# Altium footprint library WR-BHD.PcbLib: 220 footprints (part 8 of 14)
Each footprint in its own frame and in the unit in brackets; x right, y up, seen from the top. Pads: shape width x height; smd on the part's side, far side on the other; paste and mask are expansions set on the pad; w line width, h text height; cw(c..) or ccw(c..) is an arc to the next point about the centre after c.
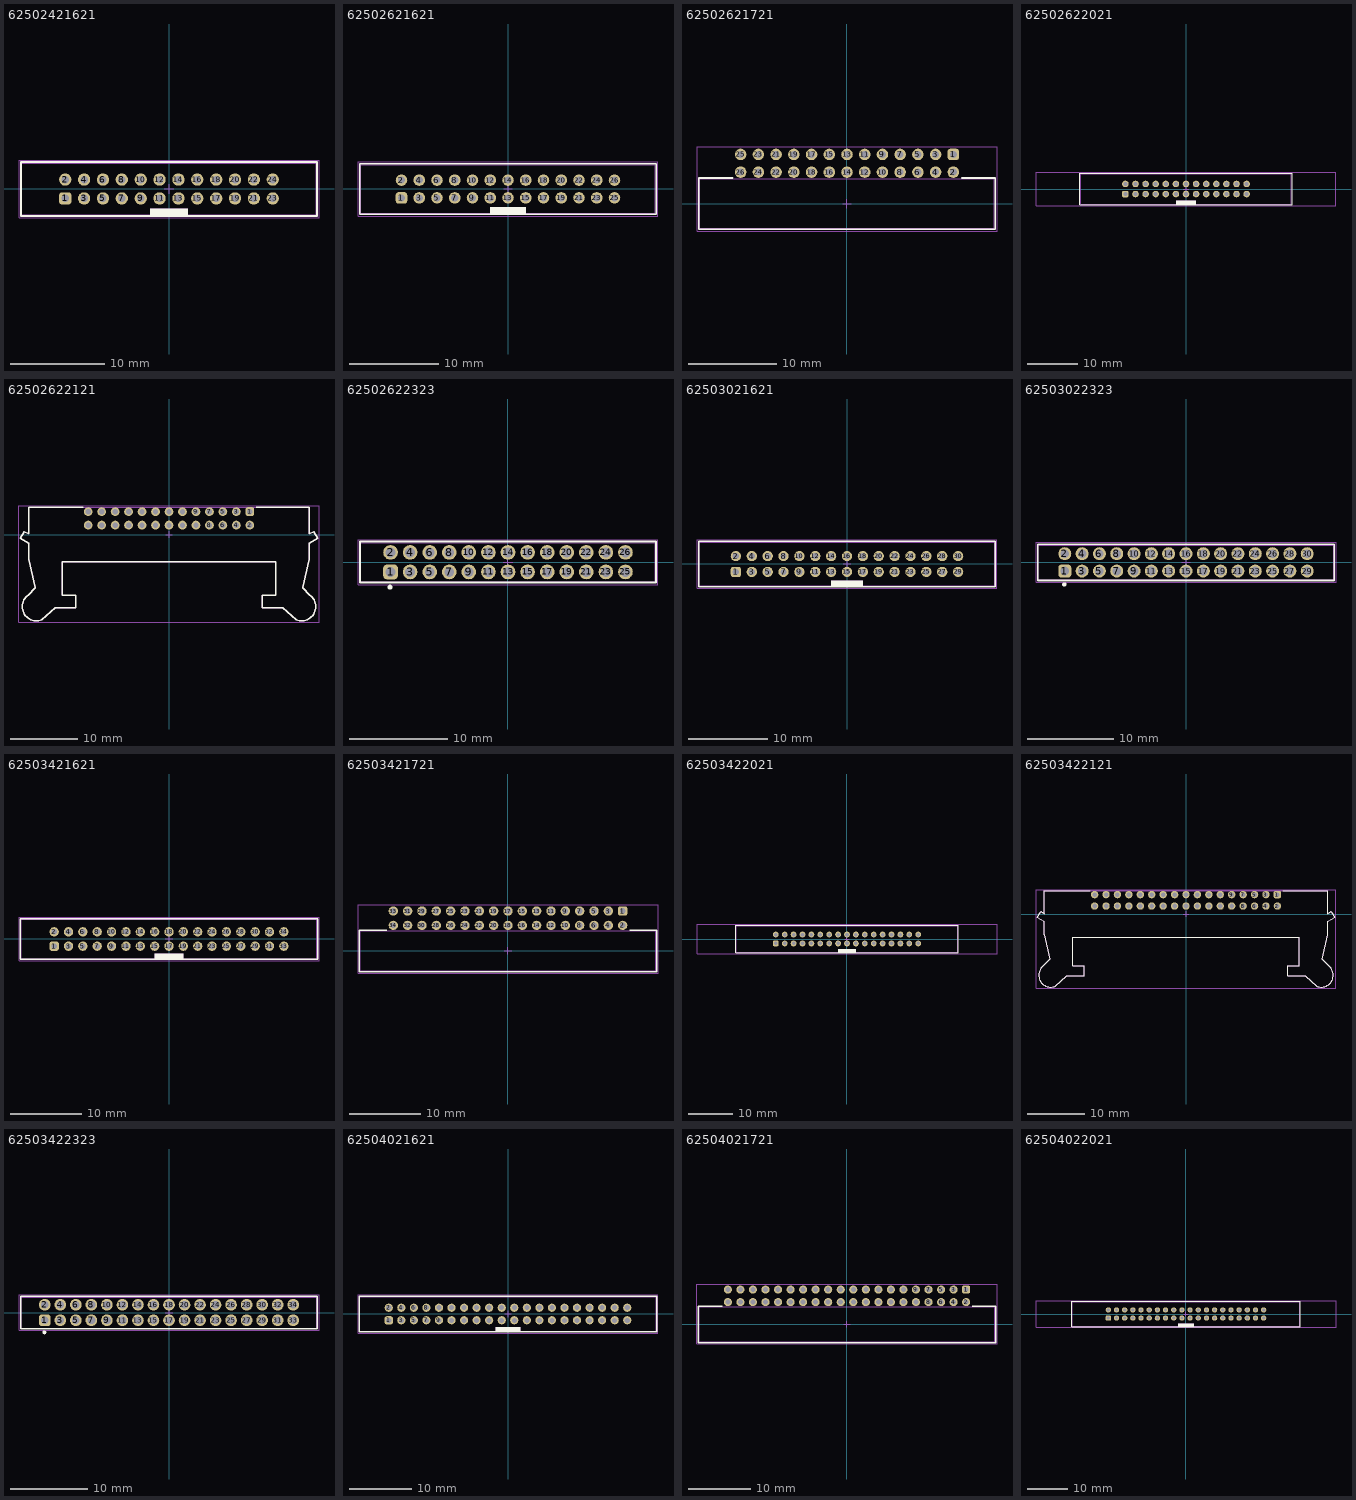
[diagram p7: the footprints below, top view; thin cyan lines are the x and y axes]

## 62502421621 [mm] "2.00mm Male Box Header, 24p"
height 5.6
pads (24):
  rrect50% 1.3x1.3 hole 0.8: 1(-11,-1)
  round 1.3 hole 0.8: 2(-11,1) 3(-9,-1) 4(-9,1) 5(-7,-1) 6(-7,1) 7(-5,-1) 8(-5,1) 9(-3,-1) 10(-3,1) 11(-1,-1) 12(-1,1) 13(1,-1) 14(1,1) 15(3,-1) 16(3,1) 17(5,-1) 18(5,1) 19(7,-1) 20(7,1) 21(9,-1) 22(9,1) 23(11,-1) 24(11,1)
Top Overlay:
  rectangle: -2,-2.85 2,-2.05
  lines w0.2: -15.7,-2.85 15.7,-2.85 15.7,2.85 -15.7,2.85 -15.7,-2.85
Top Assembly:
  rectangle: -2,-2.75 2,-2.05
  lines w0.1: -15.6,-2.75 -15.6,2.75 15.6,2.75 15.6,-2.75 -15.6,-2.75
Top Designator:
  text ".Designator" at -3.647,-0.357 h1
Top 3D Body:
  rectangle: -2,-2.75 2,-2.05
  lines w0.1: -15.6,-2.75 15.6,-2.75 15.6,2.75 -15.6,2.75 -15.6,-2.75
Top Courtyard:
  lines w0.05: -15.9,-3.05 -15.9,3.05 15.9,3.05 15.9,-3.05 -15.9,-3.05
Top Component Center:
  lines w0.1: -0.5,0 0.5,0 ; 0,-0.5 0,0.5
3D body "62502421621.stp": height 5.65, standoff -2.5, extent -15.6,-2.75 15.6,2.75

## 62502621621 [mm] "2.00mm Male Box Header, 26p"
height 5.6
pads (26):
  rrect50% 1.3x1.3 hole 0.8: 1(-12,-1)
  round 1.3 hole 0.8: 2(-12,1) 3(-10,-1) 4(-10,1) 5(-8,-1) 6(-8,1) 7(-6,-1) 8(-6,1) 9(-4,-1) 10(-4,1) 11(-2,-1) 12(-2,1) 13(0,-1) 14(0,1) 15(2,-1) 16(2,1) 17(4,-1) 18(4,1) 19(6,-1) 20(6,1) 21(8,-1) 22(8,1) 23(10,-1) 24(10,1) 25(12,-1) 26(12,1)
Top Overlay:
  rectangle: -2,-2.85 2,-2.05
  lines w0.2: -16.7,-2.85 16.7,-2.85 16.7,2.85 -16.7,2.85 -16.7,-2.85
Top Assembly:
  rectangle: -2,-2.75 2,-2.05
  lines w0.1: -16.6,-2.75 -16.6,2.75 16.6,2.75 16.6,-2.75 -16.6,-2.75
Top Designator:
  text ".Designator" at -3.647,-0.357 h1
Top 3D Body:
  rectangle: -2,-2.75 2,-2.05
  lines w0.1: -16.6,-2.75 16.6,-2.75 16.6,2.75 -16.6,2.75 -16.6,-2.75
Top Courtyard:
  lines w0.05: -16.9,-3.05 -16.9,3.05 16.9,3.05 16.9,-3.05 -16.9,-3.05
Top Component Center:
  lines w0.1: -0.5,0 0.5,0 ; 0,-0.5 0,0.5
3D body "62502621621.stp": height 5.65, standoff -2.5, extent -16.6,-2.75 16.6,2.75

## 62502621721 [mm] "2.00mm Male Angled Box Header, 26p"
height 5.4
pads (26):
  rrect50% 1.3x1.3 hole 0.8: 1(12,5.55)
  round 1.3 hole 0.8: 2(12,3.55) 3(10,5.55) 4(10,3.55) 5(8,5.55) 6(8,3.55) 7(6,5.55) 8(6,3.55) 9(4,5.55) 10(4,3.55) 11(2,5.55) 12(2,3.55) 13(0,5.55) 14(0,3.55) 15(-2,5.55) 16(-2,3.55) 17(-4,5.55) 18(-4,3.55) 19(-6,5.55) 20(-6,3.55) 21(-8,5.55) 22(-8,3.55) 23(-10,5.55) 24(-10,3.55) 25(-12,5.55) 26(-12,3.55)
Top Overlay:
  lines w0.2: -12.9,2.9 -16.725,2.9 -16.725,-2.9 16.725,-2.9 16.725,2.9 12.95,2.9
Top Assembly:
  lines w0.1: -16.6,-2.8 16.6,-2.8 16.6,2.8 -16.6,2.8 -16.6,-2.8
Top Designator:
  text ".Designator" at -3.647,-0.357 h1
Top 3D Body:
  lines w0.1: -16.6,-2.8 -16.6,2.8 16.6,2.8 16.6,-2.8 -16.6,-2.8
Top Courtyard:
  lines w0.05: -16.925,-3.1 16.925,-3.1 16.925,6.4 -16.925,6.4 -16.925,-3.1
Top Component Center:
  lines w0.1: -0.5,0 0.5,0 ; 0,-0.5 0,0.5
3D body "62502621721 (rev1).stp": height 5.5, standoff -2.85, extent -16.6,-2.8 16.6,5.8

## 62502622021 [mm] "2.00mm Male Box Header with Lever, 26p"
height 16.85
pads (26):
  rrect50% 1.3x1.3 hole 0.8: 1(-12,-1)
  round 1.3 hole 0.8: 2(-12,1) 3(-10,-1) 4(-10,1) 5(-8,-1) 6(-8,1) 7(-6,-1) 8(-6,1) 9(-4,-1) 10(-4,1) 11(-2,-1) 12(-2,1) 13(0,-1) 14(0,1) 15(2,-1) 16(2,1) 17(4,-1) 18(4,1) 19(6,-1) 20(6,1) 21(8,-1) 22(8,1) 23(10,-1) 24(10,1) 25(12,-1) 26(12,1)
Top Overlay:
  rectangle: -2,-3.1 2,-2.3
  lines w0.2: -21,-3.1 -21,3.1 21,3.1 21,-3.1 -21,-3.1
Top Assembly:
  rectangle: -2,-3 2,-2.3
  lines w0.1: -20.85,-3 -20.85,3 20.85,3 20.85,-3 -20.85,-3
Top Designator:
  text ".Designator" at -3.647,-0.357 h1
Top 3D Body:
  rectangle: -2,-3 2,-2.3
  lines w0.1: -20.85,-3 20.85,-3 20.85,3 -20.85,3 -20.85,-3
Top Courtyard:
  lines w0.05: -29.7,-3.3 29.7,-3.3 29.7,3.3 -29.7,3.3 -29.7,-3.3
Top Component Center:
  lines w0.1: -0.5,0 0.5,0 ; 0,-0.5 0,0.5
3D body "62502622021.stp": height 16.9, standoff -2.95, extent -22.062,-3 22.063,3

## 62502622121 [mm] "2.00mm Male Angled Box Header with Lever, 26p"
height 3.15
pads (26):
  rrect50% 1.3x1.3 hole 0.8: 1(12,3.4)
  round 1.3 hole 0.8: 2(12,1.4) 3(10,3.4) 4(10,1.4) 5(8,3.4) 6(8,1.4) 7(6,3.4) 8(6,1.4) 9(4,3.4) 10(4,1.4) 11(2,3.4) 12(2,1.4) 13(0,3.4) 14(0,1.4) 15(-2,3.4) 16(-2,1.4) 17(-4,3.4) 18(-4,1.4) 19(-6,3.4) 20(-6,1.4) 21(-8,3.4) 22(-8,1.4) 23(-10,3.4) 24(-10,1.4) 25(-12,3.4) 26(-12,1.4)
Top Overlay:
  lines w0.2: -21.466,0.438 -22.06,-0.59 -20.851,-1.288 -20.851,-3.622 ; -21.46,0.44 -20.848,0.087 ; -20.894,-8.986 ccw(c-19.68,-10.7) -18.865,-12.635 ; -20.892,-8.989 -19.85,-7.91 -20.837,-3.637 ; -20.85,0.089 -20.85,4.05 -12.75,4.05 ; -18.866,-12.634 -16.85,-10.85 -13.85,-10.85 -13.85,-9.05 -15.85,-9.05 -15.85,-4.05 15.85,-4.05 15.85,-9.05 13.85,-9.05 13.85,-10.85 16.85,-10.85 18.866,-12.634 ; 12.95,4.05 20.85,4.05 20.85,0.089 ; 18.865,-12.635 ccw(c19.68,-10.7) 20.894,-8.986 ; 20.837,-3.637 19.85,-7.91 20.892,-8.989 ; 20.848,0.087 21.46,0.44 ; 20.851,-3.622 20.851,-1.288 22.06,-0.59 21.466,0.438
Top Designator:
  text ".Designator" at -3.647,-0.357 h1
Top 3D Body:
  lines w0.1: -21.466,0.438 -22.06,-0.59 -20.851,-1.288 -20.851,-3.622 ; -21.46,0.44 -20.848,0.087 ; -20.894,-8.986 ccw(c-19.68,-10.7) -18.865,-12.635 ; -20.892,-8.989 -19.85,-7.91 -20.837,-3.637 ; -20.85,0.089 -20.85,4.05 20.85,4.05 ; -18.866,-12.634 -16.85,-10.85 -13.85,-10.85 -13.85,-9.05 -15.85,-9.05 -15.85,-4.05 15.85,-4.05 15.85,-9.05 13.85,-9.05 13.85,-10.85 16.85,-10.85 18.866,-12.634 ; 18.865,-12.635 ccw(c19.68,-10.7) 20.894,-8.986 ; 20.837,-3.637 19.85,-7.91 20.892,-8.989 ; 20.848,0.087 21.46,0.44 ; 20.848,4.048 20.85,4.05 ; 20.85,0.089 20.85,4.05 ; 20.851,-3.622 20.851,-1.288 22.06,-0.59 21.466,0.438
Top Courtyard:
  lines w0.05: -22.262,-13 22.262,-13 22.262,4.25 -22.262,4.25 -22.262,-13
Top Component Center:
  lines w0.1: -0.5,0 0.5,0 ; 0,-0.5 0,0.5
3D body "62502622121.stp": height 6.1, standoff -3.05, extent -22.062,-12.8 22.062,4.05

## 62502622323 [mm] "Board to Cable Transition Connector, pitch 2mm, 26p"
height 5
pads (26):
  rrect50% 1.5x1.5 hole 1: 1(-12,-1)
  round 1.5 hole 1: 2(-12,1) 3(-10,-1) 4(-10,1) 5(-8,-1) 6(-8,1) 7(-6,-1) 8(-6,1) 9(-4,-1) 10(-4,1) 11(-2,-1) 12(-2,1) 13(0,-1) 14(0,1) 15(2,-1) 16(2,1) 17(4,-1) 18(4,1) 19(6,-1) 20(6,1) 21(8,-1) 22(8,1) 23(10,-1) 24(10,1) 25(12,-1) 26(12,1)
Top Overlay:
  circle w0.25: c-12.05,-2.55 r0.125
  lines w0.2: -15.125,-2.1 15.125,-2.1 15.125,2.1 -15.125,2.1 -15.125,-2.1
Top Assembly:
  lines w0.1: -15.05,-2 15.05,-2 15.05,2 -15.05,2 -15.05,-2
Top Designator:
  text ".Designator" at -3.647,-0.357 h1
Top 3D Body:
  lines w0.1: -15.05,-2 -15.05,2 15.05,2 15.05,-2 -15.05,-2
Top Courtyard:
  lines w0.05: -15.325,-2.3 -15.325,2.3 15.325,2.3 15.325,-2.3 -15.325,-2.3
Top Component Center:
  lines w0.1: -0.5,0 0.5,0 ; 0,-0.5 0,0.5
3D body "62502622323.stp": height 7.23, standoff -2.77, extent -15.05,-2 15.05,2

## 62503021621 [mm] "2.00mm Male Box Header, 30p"
height 5.6
pads (30):
  rrect50% 1.3x1.3 hole 0.8: 1(-14,-1)
  round 1.3 hole 0.8: 2(-14,1) 3(-12,-1) 4(-12,1) 5(-10,-1) 6(-10,1) 7(-8,-1) 8(-8,1) 9(-6,-1) 10(-6,1) 11(-4,-1) 12(-4,1) 13(-2,-1) 14(-2,1) 15(0,-1) 16(0,1) 17(2,-1) 18(2,1) 19(4,-1) 20(4,1) 21(6,-1) 22(6,1) 23(8,-1) 24(8,1) 25(10,-1) 26(10,1) 27(12,-1) 28(12,1) 29(14,-1) 30(14,1)
Top Overlay:
  rectangle: -2,-2.85 2,-2.05
  lines w0.2: -18.7,-2.85 18.7,-2.85 18.7,2.85 -18.7,2.85 -18.7,-2.85
Top Assembly:
  rectangle: -2,-2.75 2,-2.05
  lines w0.1: -18.6,-2.75 -18.6,2.75 18.6,2.75 18.6,-2.75 -18.6,-2.75
Top Designator:
  text ".Designator" at -3.647,-0.357 h1
Top 3D Body:
  rectangle: -2,-2.75 2,-2.05
  lines w0.1: -18.6,-2.75 18.6,-2.75 18.6,2.75 -18.6,2.75 -18.6,-2.75
Top Courtyard:
  lines w0.05: -18.9,-3.05 -18.9,3.05 18.9,3.05 18.9,-3.05 -18.9,-3.05
Top Component Center:
  lines w0.1: -0.5,0 0.5,0 ; 0,-0.5 0,0.5
3D body "62503021621.stp": height 5.65, standoff -2.5, extent -18.6,-2.75 18.6,2.75

## 62503022323 [mm] "Board to Cable Transition Connector, pitch 2mm, 30p"
height 5
pads (30):
  rrect50% 1.5x1.5 hole 1: 1(-14,-1)
  round 1.5 hole 1: 2(-14,1) 3(-12,-1) 4(-12,1) 5(-10,-1) 6(-10,1) 7(-8,-1) 8(-8,1) 9(-6,-1) 10(-6,1) 11(-4,-1) 12(-4,1) 13(-2,-1) 14(-2,1) 15(0,-1) 16(0,1) 17(2,-1) 18(2,1) 19(4,-1) 20(4,1) 21(6,-1) 22(6,1) 23(8,-1) 24(8,1) 25(10,-1) 26(10,1) 27(12,-1) 28(12,1) 29(14,-1) 30(14,1)
Top Overlay:
  circle w0.25: c-14.05,-2.55 r0.125
  lines w0.2: -17.125,-2.1 17.125,-2.1 17.125,2.1 -17.125,2.1 -17.125,-2.1
Top Assembly:
  lines w0.1: -17.05,-2 17.05,-2 17.05,2 -17.05,2 -17.05,-2
Top Designator:
  text ".Designator" at -3.647,-0.357 h1
Top 3D Body:
  lines w0.1: -17.05,-2 -17.05,2 17.05,2 17.05,-2 -17.05,-2
Top Courtyard:
  lines w0.05: -17.325,-2.3 -17.325,2.3 17.325,2.3 17.325,-2.3 -17.325,-2.3
Top Component Center:
  lines w0.1: -0.5,0 0.5,0 ; 0,-0.5 0,0.5
3D body "62503022323.stp": height 7.23, standoff -2.77, extent -17.05,-2 17.05,2

## 62503421621 [mm] "2.00mm Male Box Header, 34p"
height 5.6
pads (34):
  rrect50% 1.3x1.3 hole 0.8: 1(-16,-1)
  round 1.3 hole 0.8: 2(-16,1) 3(-14,-1) 4(-14,1) 5(-12,-1) 6(-12,1) 7(-10,-1) 8(-10,1) 9(-8,-1) 10(-8,1) 11(-6,-1) 12(-6,1) 13(-4,-1) 14(-4,1) 15(-2,-1) 16(-2,1) 17(0,-1) 18(0,1) 19(2,-1) 20(2,1) 21(4,-1) 22(4,1) 23(6,-1) 24(6,1) 25(8,-1) 26(8,1) 27(10,-1) 28(10,1) 29(12,-1) 30(12,1) 31(14,-1) 32(14,1) 33(16,-1) 34(16,1)
Top Overlay:
  rectangle: -2,-2.85 2,-2.05
  lines w0.2: -20.7,-2.85 20.7,-2.85 20.7,2.85 -20.7,2.85 -20.7,-2.85
Top Assembly:
  rectangle: -2,-2.75 2,-2.05
  lines w0.1: -20.6,-2.75 -20.6,2.75 20.6,2.75 20.6,-2.75 -20.6,-2.75
Top Designator:
  text ".Designator" at -3.647,-0.357 h1
Top 3D Body:
  rectangle: -2,-2.75 2,-2.05
  lines w0.1: -20.6,-2.75 20.6,-2.75 20.6,2.75 -20.6,2.75 -20.6,-2.75
Top Courtyard:
  lines w0.05: -20.9,-3.05 -20.9,3.05 20.9,3.05 20.9,-3.05 -20.9,-3.05
Top Component Center:
  lines w0.1: -0.5,0 0.5,0 ; 0,-0.5 0,0.5
3D body "62503421621.stp": height 5.65, standoff -2.5, extent -20.6,-2.75 20.6,2.75

## 62503421721 [mm] "2.00mm Male Angled Box Header, 34p"
height 5.4
pads (34):
  rrect50% 1.3x1.3 hole 0.8: 1(16,5.55)
  round 1.3 hole 0.8: 2(16,3.55) 3(14,5.55) 4(14,3.55) 5(12,5.55) 6(12,3.55) 7(10,5.55) 8(10,3.55) 9(8,5.55) 10(8,3.55) 11(6,5.55) 12(6,3.55) 13(4,5.55) 14(4,3.55) 15(2,5.55) 16(2,3.55) 17(0,5.55) 18(0,3.55) 19(-2,5.55) 20(-2,3.55) 21(-4,5.55) 22(-4,3.55) 23(-6,5.55) 24(-6,3.55) 25(-8,5.55) 26(-8,3.55) 27(-10,5.55) 28(-10,3.55) 29(-12,5.55) 30(-12,3.55) 31(-14,5.55) 32(-14,3.55) 33(-16,5.55) 34(-16,3.55)
Top Overlay:
  lines w0.2: -16.9,2.9 -20.725,2.9 -20.725,-2.9 20.725,-2.9 20.725,2.9 16.95,2.9
Top Assembly:
  lines w0.1: -20.6,-2.8 -20.6,2.8 20.6,2.8 20.6,-2.8 -20.6,-2.8
Top Designator:
  text ".Designator" at -3.647,-0.357 h1
Top 3D Body:
  lines w0.1: -20.6,-2.8 20.6,-2.8 20.6,2.8 -20.6,2.8 -20.6,-2.8
Top Courtyard:
  lines w0.05: -20.925,-3.1 -20.925,6.4 20.925,6.4 20.925,-3.1 -20.925,-3.1
Top Component Center:
  lines w0.1: -0.5,0 0.5,0 ; 0,-0.5 0,0.5
3D body "62503421721 (rev1).stp": height 5.5, standoff -2.85, extent -20.6,-2.8 20.6,5.8

## 62503422021 [mm] "2.00mm Male Box Header with Lever, 34p"
height 16.85
pads (34):
  rrect50% 1.3x1.3 hole 0.8: 1(-16,-1)
  round 1.3 hole 0.8: 2(-16,1) 3(-14,-1) 4(-14,1) 5(-12,-1) 6(-12,1) 7(-10,-1) 8(-10,1) 9(-8,-1) 10(-8,1) 11(-6,-1) 12(-6,1) 13(-4,-1) 14(-4,1) 15(-2,-1) 16(-2,1) 17(0,-1) 18(0,1) 19(2,-1) 20(2,1) 21(4,-1) 22(4,1) 23(6,-1) 24(6,1) 25(8,-1) 26(8,1) 27(10,-1) 28(10,1) 29(12,-1) 30(12,1) 31(14,-1) 32(14,1) 33(16,-1) 34(16,1)
Top Overlay:
  rectangle: -2,-3.1 2,-2.3
  lines w0.2: -25,-3.1 25,-3.1 25,3.1 -25,3.1 -25,-3.1
Top Assembly:
  rectangle: -2,-3 2,-2.3
  lines w0.1: -24.85,-3 24.85,-3 24.85,3 -24.85,3 -24.85,-3
Top Designator:
  text ".Designator" at -3.647,-0.357 h1
Top 3D Body:
  rectangle: -2,-3 2,-2.3
  lines w0.1: -24.85,-3 -24.85,3 24.85,3 24.85,-3 -24.85,-3
Top Courtyard:
  lines w0.05: -33.7,-3.3 -33.7,3.3 33.7,3.3 33.7,-3.3 -33.7,-3.3
Top Component Center:
  lines w0.1: -0.5,0 0.5,0 ; 0,-0.5 0,0.5
3D body "62503422021.stp": height 16.9, standoff -2.95, extent -26.062,-3 26.063,3

## 62503422121 [mm] "2.00mm Male Angled Box Header with Lever, 34p"
height 3.15
pads (34):
  rrect50% 1.3x1.3 hole 0.8: 1(16,3.4)
  round 1.3 hole 0.8: 2(16,1.4) 3(14,3.4) 4(14,1.4) 5(12,3.4) 6(12,1.4) 7(10,3.4) 8(10,1.4) 9(8,3.4) 10(8,1.4) 11(6,3.4) 12(6,1.4) 13(4,3.4) 14(4,1.4) 15(2,3.4) 16(2,1.4) 17(0,3.4) 18(0,1.4) 19(-2,3.4) 20(-2,1.4) 21(-4,3.4) 22(-4,1.4) 23(-6,3.4) 24(-6,1.4) 25(-8,3.4) 26(-8,1.4) 27(-10,3.4) 28(-10,1.4) 29(-12,3.4) 30(-12,1.4) 31(-14,3.4) 32(-14,1.4) 33(-16,3.4) 34(-16,1.4)
Top Overlay:
  lines w0.2: -25.466,0.438 -26.06,-0.59 -24.851,-1.288 -24.851,-3.622 ; -25.46,0.44 -24.848,0.087 ; -24.894,-8.986 ccw(c-23.68,-10.7) -22.865,-12.635 ; -24.892,-8.989 -23.85,-7.91 -24.837,-3.637 ; -24.85,0.089 -24.85,4.05 -16.75,4.05 ; -22.866,-12.634 -20.85,-10.85 -17.85,-10.85 -17.85,-9.05 -19.85,-9.05 -19.85,-4.05 19.85,-4.05 19.85,-9.05 17.85,-9.05 17.85,-10.85 20.85,-10.85 22.866,-12.634 ; 16.95,4.05 24.85,4.05 24.85,0.089 ; 22.865,-12.635 ccw(c23.68,-10.7) 24.894,-8.986 ; 24.837,-3.637 23.85,-7.91 24.892,-8.989 ; 24.848,0.087 25.46,0.44 ; 24.851,-3.622 24.851,-1.288 26.06,-0.59 25.466,0.438
Top Designator:
  text ".Designator" at -3.647,-0.357 h1
Top 3D Body:
  lines w0.1: -25.466,0.438 -26.06,-0.59 -24.851,-1.288 -24.851,-3.622 ; -25.46,0.44 -24.848,0.087 ; -24.894,-8.986 ccw(c-23.68,-10.7) -22.865,-12.635 ; -24.892,-8.989 -23.85,-7.91 -24.837,-3.637 ; -24.85,0.089 -24.85,4.05 24.85,4.05 ; -22.866,-12.634 -20.85,-10.85 -17.85,-10.85 -17.85,-9.05 -19.85,-9.05 -19.85,-4.05 19.85,-4.05 19.85,-9.05 17.85,-9.05 17.85,-10.85 20.85,-10.85 22.866,-12.634 ; 22.865,-12.635 ccw(c23.68,-10.7) 24.894,-8.986 ; 24.837,-3.637 23.85,-7.91 24.892,-8.989 ; 24.848,0.087 25.46,0.44 ; 24.848,4.048 24.85,4.05 ; 24.85,0.089 24.85,4.05 ; 24.851,-3.622 24.851,-1.288 26.06,-0.59 25.466,0.438
Top Courtyard:
  lines w0.05: -26.262,-13 -26.262,4.25 26.262,4.25 26.262,-13 -26.262,-13
Top Component Center:
  lines w0.1: -0.5,0 0.5,0 ; 0,-0.5 0,0.5
3D body "62503422121.stp": height 6.1, standoff -3.05, extent -26.062,-12.8 26.062,4.05

## 62503422323 [mm] "Board to Cable Transition Connector, pitch 2mm, 34p"
height 5
pads (34):
  rrect50% 1.5x1.5 hole 1: 1(-16,-1)
  round 1.5 hole 1: 2(-16,1) 3(-14,-1) 4(-14,1) 5(-12,-1) 6(-12,1) 7(-10,-1) 8(-10,1) 9(-8,-1) 10(-8,1) 11(-6,-1) 12(-6,1) 13(-4,-1) 14(-4,1) 15(-2,-1) 16(-2,1) 17(0,-1) 18(0,1) 19(2,-1) 20(2,1) 21(4,-1) 22(4,1) 23(6,-1) 24(6,1) 25(8,-1) 26(8,1) 27(10,-1) 28(10,1) 29(12,-1) 30(12,1) 31(14,-1) 32(14,1) 33(16,-1) 34(16,1)
Top Overlay:
  circle w0.25: c-16.05,-2.55 r0.125
  lines w0.2: -19.125,-2.1 19.125,-2.1 19.125,2.1 -19.125,2.1 -19.125,-2.1
Top Assembly:
  lines w0.1: -19.05,-2 19.05,-2 19.05,2 -19.05,2 -19.05,-2
Top Designator:
  text ".Designator" at -3.647,-0.357 h1
Top 3D Body:
  lines w0.1: -19.05,-2 -19.05,2 19.05,2 19.05,-2 -19.05,-2
Top Courtyard:
  lines w0.05: -19.325,-2.3 -19.325,2.3 19.325,2.3 19.325,-2.3 -19.325,-2.3
Top Component Center:
  lines w0.1: -0.5,0 0.5,0 ; 0,-0.5 0,0.5
3D body "62503422323.stp": height 7.23, standoff -2.77, extent -19.05,-2 19.05,2

## 62504021621 [mm] "2.00mm Male Box Header, 40p"
height 5.6
pads (40):
  rrect50% 1.3x1.3 hole 0.8: 1(-19,-1)
  round 1.3 hole 0.8: 2(-19,1) 3(-17,-1) 4(-17,1) 5(-15,-1) 6(-15,1) 7(-13,-1) 8(-13,1) 9(-11,-1) 10(-11,1) 11(-9,-1) 12(-9,1) 13(-7,-1) 14(-7,1) 15(-5,-1) 16(-5,1) 17(-3,-1) 18(-3,1) 19(-1,-1) 20(-1,1) 21(1,-1) 22(1,1) 23(3,-1) 24(3,1) 25(5,-1) 26(5,1) 27(7,-1) 28(7,1) 29(9,-1) 30(9,1) 31(11,-1) 32(11,1) 33(13,-1) 34(13,1) 35(15,-1) 36(15,1) 37(17,-1) 38(17,1) 39(19,-1) 40(19,1)
Top Overlay:
  rectangle: -2,-2.85 2,-2.05
  lines w0.2: -23.7,-2.85 -23.7,2.85 23.7,2.85 23.7,-2.85 -23.7,-2.85
Top Assembly:
  rectangle: -2,-2.75 2,-2.05
  lines w0.1: -23.6,-2.75 23.6,-2.75 23.6,2.75 -23.6,2.75 -23.6,-2.75
Top Designator:
  text ".Designator" at -3.647,-0.357 h1
Top 3D Body:
  rectangle: -2,-2.75 2,-2.05
  lines w0.1: -23.6,-2.75 -23.6,2.75 23.6,2.75 23.6,-2.75 -23.6,-2.75
Top Courtyard:
  lines w0.05: -23.9,-3.05 23.9,-3.05 23.9,3.05 -23.9,3.05 -23.9,-3.05
Top Component Center:
  lines w0.1: -0.5,0 0.5,0 ; 0,-0.5 0,0.5
3D body "62504021621.stp": height 5.65, standoff -2.5, extent -23.6,-2.75 23.6,2.75

## 62504021721 [mm] "2.00mm Male Angled Box Header, 40p"
height 5.4
pads (40):
  rrect50% 1.3x1.3 hole 0.8: 1(19,5.55)
  round 1.3 hole 0.8: 2(19,3.55) 3(17,5.55) 4(17,3.55) 5(15,5.55) 6(15,3.55) 7(13,5.55) 8(13,3.55) 9(11,5.55) 10(11,3.55) 11(9,5.55) 12(9,3.55) 13(7,5.55) 14(7,3.55) 15(5,5.55) 16(5,3.55) 17(3,5.55) 18(3,3.55) 19(1,5.55) 20(1,3.55) 21(-1,5.55) 22(-1,3.55) 23(-3,5.55) 24(-3,3.55) 25(-5,5.55) 26(-5,3.55) 27(-7,5.55) 28(-7,3.55) 29(-9,5.55) 30(-9,3.55) 31(-11,5.55) 32(-11,3.55) 33(-13,5.55) 34(-13,3.55) 35(-15,5.55) 36(-15,3.55) 37(-17,5.55) 38(-17,3.55) 39(-19,5.55) 40(-19,3.55)
Top Overlay:
  lines w0.2: -19.9,2.9 -23.725,2.9 -23.725,-2.9 23.725,-2.9 23.725,2.9 19.95,2.9
Top Assembly:
  lines w0.1: -23.6,-2.8 -23.6,2.8 23.6,2.8 23.6,-2.8 -23.6,-2.8
Top Designator:
  text ".Designator" at -3.647,-0.357 h1
Top 3D Body:
  lines w0.1: -23.6,-2.8 23.6,-2.8 23.6,2.8 -23.6,2.8 -23.6,-2.8
Top Courtyard:
  lines w0.05: -23.925,-3.1 -23.925,6.4 23.925,6.4 23.925,-3.1 -23.925,-3.1
Top Component Center:
  lines w0.1: -0.5,0 0.5,0 ; 0,-0.5 0,0.5
3D body "62504021721 (rev1).stp": height 5.5, standoff -2.85, extent -23.6,-2.8 23.6,5.8

## 62504022021 [mm] "2.00mm Male Box Header with Lever, 40p"
height 16.85
pads (40):
  rrect50% 1.3x1.3 hole 0.8: 1(-19,-1)
  round 1.3 hole 0.8: 2(-19,1) 3(-17,-1) 4(-17,1) 5(-15,-1) 6(-15,1) 7(-13,-1) 8(-13,1) 9(-11,-1) 10(-11,1) 11(-9,-1) 12(-9,1) 13(-7,-1) 14(-7,1) 15(-5,-1) 16(-5,1) 17(-3,-1) 18(-3,1) 19(-1,-1) 20(-1,1) 21(1,-1) 22(1,1) 23(3,-1) 24(3,1) 25(5,-1) 26(5,1) 27(7,-1) 28(7,1) 29(9,-1) 30(9,1) 31(11,-1) 32(11,1) 33(13,-1) 34(13,1) 35(15,-1) 36(15,1) 37(17,-1) 38(17,1) 39(19,-1) 40(19,1)
Top Overlay:
  rectangle: -2,-3.1 2,-2.3
  lines w0.2: -28,-3.1 -28,3.1 28,3.1 28,-3.1 -28,-3.1
Top Assembly:
  rectangle: -2,-3 2,-2.3
  lines w0.1: -27.85,-3 -27.85,3 27.85,3 27.85,-3 -27.85,-3
Top Designator:
  text ".Designator" at -3.647,-0.357 h1
Top 3D Body:
  rectangle: -2,-3 2,-2.3
  lines w0.1: -27.85,-3 27.85,-3 27.85,3 -27.85,3 -27.85,-3
Top Courtyard:
  lines w0.05: -36.7,-3.3 36.7,-3.3 36.7,3.3 -36.7,3.3 -36.7,-3.3
Top Component Center:
  lines w0.1: -0.5,0 0.5,0 ; 0,-0.5 0,0.5
3D body "62504022021.stp": height 16.9, standoff -2.95, extent -29.062,-3 29.063,3